# Altium footprint library 2020-12-05_19-42-01.PcbLib: 3 footprints
Each footprint in its own frame and in the unit in brackets; x right, y up, seen from the top. Pads: shape width x height; smd on the part's side, far side on the other; paste and mask are expansions set on the pad; w line width, h text height; cw(c..) or ccw(c..) is an arc to the next point about the centre after c.
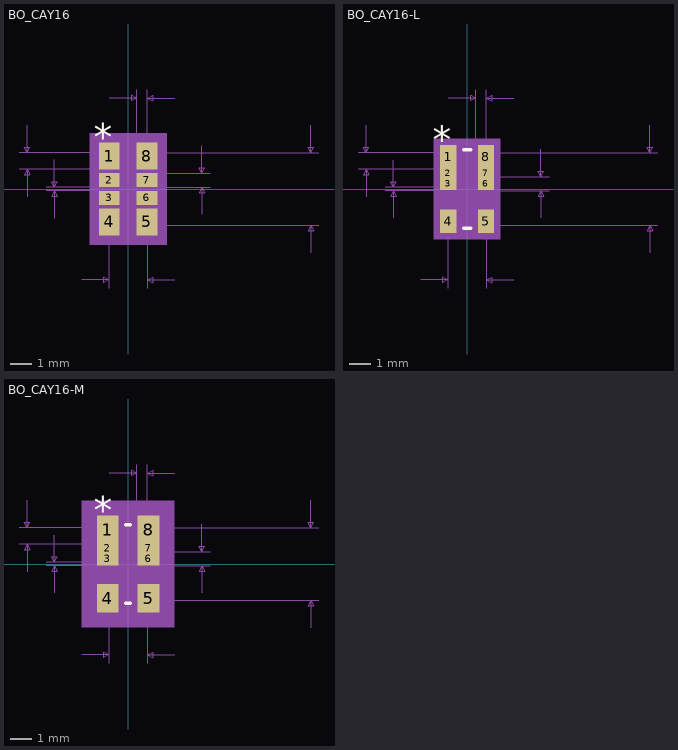
[diagram p0: the footprints below, top view; thin cyan lines are the x and y axes]

## BO_CAY16 [mil]
pads (8):
  rect 38x49 smd: 1(-34.5,60.5) 4(-34.5,-60.5) 5(34.5,-60.5) 8(34.5,60.5)
  rect 38x26 smd mask+0: 2(-34.5,16.35) 3(-34.5,-16.3) 6(34.5,-16.35) 7(34.5,16.3)
Top Overlay:
  text "*" at -63,70 h50
Mechanical 5:
  region: 71,-102.5 -71,-102.5 -71,102.5 71,102.5
Mechanical 7:
  lines w1: -200.5,36 -35.5,36 ; -200.5,67 -35.5,67 ; -185.5,-14 -185.5,36 ; -185.5,117 -185.5,67 ; -150.5,-3.33 35.5,-3.33 ; -150.5,3.33 35.5,3.33 150.5,3.33 ; -135.5,-53.33 -135.5,-3.33 ; -135.5,53.33 -135.5,3.33 ; -85.5,-167 -35.5,-167 ; -35.5,-182 -35.5,8.18 ; -34.5,167 15.5,167 ; 15.5,8.18 15.5,182 ; 35.5,-182 35.5,8.18 35.5,182 ; 35.5,-67 350.5,-67 ; 35.5,29.32 150.5,29.32 ; 35.5,67 350.5,67 ; 85.5,-167 35.5,-167 ; 85.5,167 35.5,167 ; 135.5,-46.67 135.5,3.33 ; 135.5,79.33 135.5,29.32 ; 335.5,-117 335.5,-67 ; 335.5,117 335.5,67 ; -185.5,36 -190.5,26 -180.5,26 -185.5,36 ; -185.5,67 -190.5,77 -180.5,77 -185.5,67 ; -135.5,-3.33 -140.5,-13.32 -130.5,-13.32 -135.5,-3.33 ; -135.5,3.33 -140.5,13.32 -130.5,13.32 -135.5,3.33 ; -35.5,-167 -45.5,-162 -45.5,-172 -35.5,-167 ; 15.5,167 5.5,172 5.5,162 15.5,167 ; 35.5,-167 45.5,-162 45.5,-172 35.5,-167 ; 35.5,167 45.5,172 45.5,162 35.5,167 ; 135.5,3.33 130.5,-6.67 140.5,-6.67 135.5,3.33 ; 135.5,29.32 130.5,39.33 140.5,39.33 135.5,29.32 ; 335.5,-67 330.5,-77 340.5,-77 335.5,-67 ; 335.5,67 330.5,77 340.5,77 335.5,67
  text "Default Padstyle: RX38Y26D0TSM2" at -387.5,-317 h50
  text "Alternate 1 Padstyle: OX60Y90D30P" at -412.5,-417 h50
  text "Alternate 2 Padstyle: OX90Y60D30P" at -412.5,-517 h50
  text "0.02in/0.508mm" at -62,187 h25
  text "0.071in/1.803mm" at -93.75,-212 h25
  text "0.026in/0.66mm" at 155.5,-12.5 h25
  text "0.007in/0.169mm" at -343,-12.5 h25
  text "0.134in/3.404mm" at 355.5,-12.5 h25
  text "0.031in/0.787mm" at -393,39 h25
Mechanical 13:
  lines w0: -35.5,-35.95 ccw(c-35.5,-32.62) -35.5,-29.3 ; -35.5,-3.3 ccw(c-35.5,0.03) -35.5,3.35 ; -35.5,29.35 ccw(c-35.5,32.67) -35.5,36 ; 35.5,-35.95 cw(c35.5,-32.62) 35.5,-29.3 ; 35.5,-3.3 cw(c35.5,0.03) 35.5,3.35 ; 35.5,29.35 cw(c35.5,32.67) 35.5,36
  lines w1: -35.5,-36 -35.5,-67 35.5,-67 35.5,-36 ; -35.5,-29.3 -35.5,-3.3 ; -35.5,3.35 -35.5,29.35 ; -35.5,36 -35.5,67 35.5,67 35.5,36 ; -35.5,57 -25.5,67 ; 35.5,-29.3 35.5,-3.3 ; 35.5,3.35 35.5,29.35
  text "*" at -33,22 h50
Mechanical 15:
  region: 63.5,-95 -63.5,-95 -63.5,95 63.5,95
  region: 35.5,-67 -35.5,-67 -35.5,67 35.5,67
  lines w6: -63.5,-95 -63.5,95 63.5,95 63.5,-95 -63.5,-95
3D body: height 10, standoff 0, extent 0,0 10,10

## BO_CAY16-L [mil]
pads (8):
  rect 30x43 smd paste+0 mask+0: 1(-34.5,59.5) 4(-34.5,-59.5) 5(34.5,-59.5) 8(34.5,59.5)
  rect 30x22 smd paste+0 mask+0: 2(-34.5,29.31) 3(-34.5,9.62) 6(34.5,9.62) 7(34.5,29.31)
Top Overlay:
  lines w6: -6.4,-72 6.4,-72 ; -6.4,72 6.4,72
  text "*" at -63,66 h50
Mechanical 5:
  region: 61,-92.5 -61,-92.5 -61,92.5 61,92.5
Mechanical 7:
  lines w1: -200.5,36 -35.5,36 ; -200.5,67 -35.5,67 ; -185.5,-14 -185.5,36 ; -185.5,117 -185.5,67 ; -150.5,-3.15 35.5,-3.15 150.5,-3.15 ; -150.5,3.15 35.5,3.15 ; -135.5,-53.16 -135.5,-3.15 ; -135.5,53.16 -135.5,3.15 ; -85.5,-167 -35.5,-167 ; -35.5,-182 -35.5,14.65 ; -34.5,167 15.5,167 ; 15.5,14.65 15.5,182 ; 35.5,-182 35.5,14.65 35.5,182 ; 35.5,-67 350.5,-67 ; 35.5,22.84 150.5,22.84 ; 35.5,67 350.5,67 ; 85.5,-167 35.5,-167 ; 85.5,167 35.5,167 ; 135.5,-53.16 135.5,-3.15 ; 135.5,72.84 135.5,22.84 ; 335.5,-117 335.5,-67 ; 335.5,117 335.5,67 ; -185.5,36 -190.5,26 -180.5,26 -185.5,36 ; -185.5,67 -190.5,77 -180.5,77 -185.5,67 ; -135.5,-3.15 -140.5,-13.15 -130.5,-13.15 -135.5,-3.15 ; -135.5,3.15 -140.5,13.15 -130.5,13.15 -135.5,3.15 ; -35.5,-167 -45.5,-162 -45.5,-172 -35.5,-167 ; 15.5,167 5.5,172 5.5,162 15.5,167 ; 35.5,-167 45.5,-162 45.5,-172 35.5,-167 ; 35.5,167 45.5,172 45.5,162 35.5,167 ; 135.5,-3.15 130.5,-13.15 140.5,-13.15 135.5,-3.15 ; 135.5,22.84 130.5,32.84 140.5,32.84 135.5,22.84 ; 335.5,-67 330.5,-77 340.5,-77 335.5,-67 ; 335.5,67 330.5,77 340.5,77 335.5,67
  text "Inner Pad Padstyle: RX30Y22D0T" at -375,-317 h50
  text "Outer Pad Padstyle: RX30Y43D0T" at -375,-417 h50
  text "Alternate 1 Padstyle: OX60Y90D30P" at -412.5,-517 h50
  text "Alternate 2 Padstyle: OX90Y60D30P" at -412.5,-617 h50
  text "0.02in/0.508mm" at -62,187 h25
  text "0.071in/1.803mm" at -93.75,-212 h25
  text "0.026in/0.66mm" at 155.5,-12.5 h25
  text "-0.006in/-0.16mm" at -355.5,-12.5 h25
  text "0.134in/3.404mm" at 355.5,-12.5 h25
  text "0.031in/0.787mm" at -393,39 h25
Mechanical 13:
  lines w0: -35.5,-3.38 cw(c-35.5,-0.23) -35.5,2.93 ; -35.5,16.31 cw(c-35.5,19.46) -35.5,22.62 ; -35.5,36 cw(c-35.5,39.16) -35.5,42.31 ; 35.5,-3.38 ccw(c35.5,-0.23) 35.5,2.93 ; 35.5,16.31 ccw(c35.5,19.46) 35.5,22.62 ; 35.5,36 ccw(c35.5,39.16) 35.5,42.31
  lines w1: -35.5,-3.38 -35.5,22.62 ; -35.5,2.93 -35.5,-36 -35.5,-67 35.5,-67 35.5,-36 35.5,2.93 ; -35.5,16.31 -35.5,42.31 ; -35.5,36 -35.5,67 35.5,67 35.5,36 ; -35.5,57 -25.5,67 ; 35.5,-3.38 35.5,22.62 ; 35.5,16.31 35.5,42.31
  text "*" at -33,22 h50
Mechanical 15:
  region: 53.5,-85 -53.5,-85 -53.5,85 53.5,85
  region: 35.5,-67 -35.5,-67 -35.5,67 35.5,67
  lines w6: -53.5,-85 -53.5,85 53.5,85 53.5,-85 -53.5,-85
3D body: height 10, standoff 0, extent 0,0 10,10

## BO_CAY16-M [mil]
pads (8):
  rect 40x52 smd paste+0 mask+0: 1(-37.5,63) 4(-37.5,-63) 5(37.5,-63) 8(37.5,63)
  rect 40x24 smd paste+0 mask-1: 2(-37.5,29.31) 3(-37.5,9.62) 6(37.5,9.62) 7(37.5,29.31)
Top Overlay:
  lines w6: -4.4,-72 4.4,-72 ; -4.4,72 4.4,72
  text "*" at -63,74 h50
Mechanical 5:
  region: 85,-116.5 -85,-116.5 -85,116.5 85,116.5
Mechanical 7:
  lines w1: -200.5,36 -35.5,36 ; -200.5,67 -35.5,67 ; -185.5,-14 -185.5,36 ; -185.5,117 -185.5,67 ; -150.5,-3.15 35.5,-3.15 150.5,-3.15 ; -150.5,3.15 35.5,3.15 ; -135.5,-53.16 -135.5,-3.15 ; -135.5,53.16 -135.5,3.15 ; -85.5,-167 -35.5,-167 ; -35.5,-182 -35.5,14.65 ; -34.5,167 15.5,167 ; 15.5,14.65 15.5,182 ; 35.5,-182 35.5,14.65 35.5,182 ; 35.5,-67 350.5,-67 ; 35.5,22.84 150.5,22.84 ; 35.5,67 350.5,67 ; 85.5,-167 35.5,-167 ; 85.5,167 35.5,167 ; 135.5,-53.16 135.5,-3.15 ; 135.5,72.84 135.5,22.84 ; 335.5,-117 335.5,-67 ; 335.5,117 335.5,67 ; -185.5,36 -190.5,26 -180.5,26 -185.5,36 ; -185.5,67 -190.5,77 -180.5,77 -185.5,67 ; -135.5,-3.15 -140.5,-13.15 -130.5,-13.15 -135.5,-3.15 ; -135.5,3.15 -140.5,13.15 -130.5,13.15 -135.5,3.15 ; -35.5,-167 -45.5,-162 -45.5,-172 -35.5,-167 ; 15.5,167 5.5,172 5.5,162 15.5,167 ; 35.5,-167 45.5,-162 45.5,-172 35.5,-167 ; 35.5,167 45.5,172 45.5,162 35.5,167 ; 135.5,-3.15 130.5,-13.15 140.5,-13.15 135.5,-3.15 ; 135.5,22.84 130.5,32.84 140.5,32.84 135.5,22.84 ; 335.5,-67 330.5,-77 340.5,-77 335.5,-67 ; 335.5,67 330.5,77 340.5,77 335.5,67
  text "Inner Pad Padstyle: RX40Y24D0TSM" at -400,-317 h50
  text "Outer Pad Padstyle: RX40Y52D0TSM" at -400,-417 h50
  text "Alternate 1 Padstyle: OX60Y90D30P" at -412.5,-517 h50
  text "Alternate 2 Padstyle: OX90Y60D30P" at -412.5,-617 h50
  text "0.02in/0.508mm" at -62,187 h25
  text "0.071in/1.803mm" at -93.75,-212 h25
  text "0.026in/0.66mm" at 155.5,-12.5 h25
  text "-0.006in/-0.16mm" at -355.5,-12.5 h25
  text "0.134in/3.404mm" at 355.5,-12.5 h25
  text "0.031in/0.787mm" at -393,39 h25
Mechanical 13:
  lines w0: -35.5,-3.38 cw(c-35.5,-0.23) -35.5,2.93 ; -35.5,16.31 cw(c-35.5,19.46) -35.5,22.62 ; -35.5,36 cw(c-35.5,39.16) -35.5,42.31 ; 35.5,-3.38 ccw(c35.5,-0.23) 35.5,2.93 ; 35.5,16.31 ccw(c35.5,19.46) 35.5,22.62 ; 35.5,36 ccw(c35.5,39.16) 35.5,42.31
  lines w1: -35.5,-3.38 -35.5,22.62 ; -35.5,2.93 -35.5,-36 -35.5,-67 35.5,-67 35.5,-36 35.5,2.93 ; -35.5,16.31 -35.5,42.31 ; -35.5,36 -35.5,67 35.5,67 35.5,36 ; -35.5,57 -25.5,67 ; 35.5,-3.38 35.5,22.62 ; 35.5,16.31 35.5,42.31
  text "*" at -33,22 h50
Mechanical 15:
  region: 77.5,-109 -77.5,-109 -77.5,109 77.5,109
  region: 35.5,-67 -35.5,-67 -35.5,67 35.5,67
  lines w6: -77.5,-109 -77.5,109 77.5,109 77.5,-109 -77.5,-109
3D body: height 10, standoff 0, extent 0,0 10,10